# Altium footprint library MyPCBLib.PcbLib: 103 footprints (part 5 of 7)
Each footprint in its own frame and in the unit in brackets; x right, y up, seen from the top. Pads: shape width x height; smd on the part's side, far side on the other; paste and mask are expansions set on the pad; w line width, h text height; cw(c..) or ccw(c..) is an arc to the next point about the centre after c.
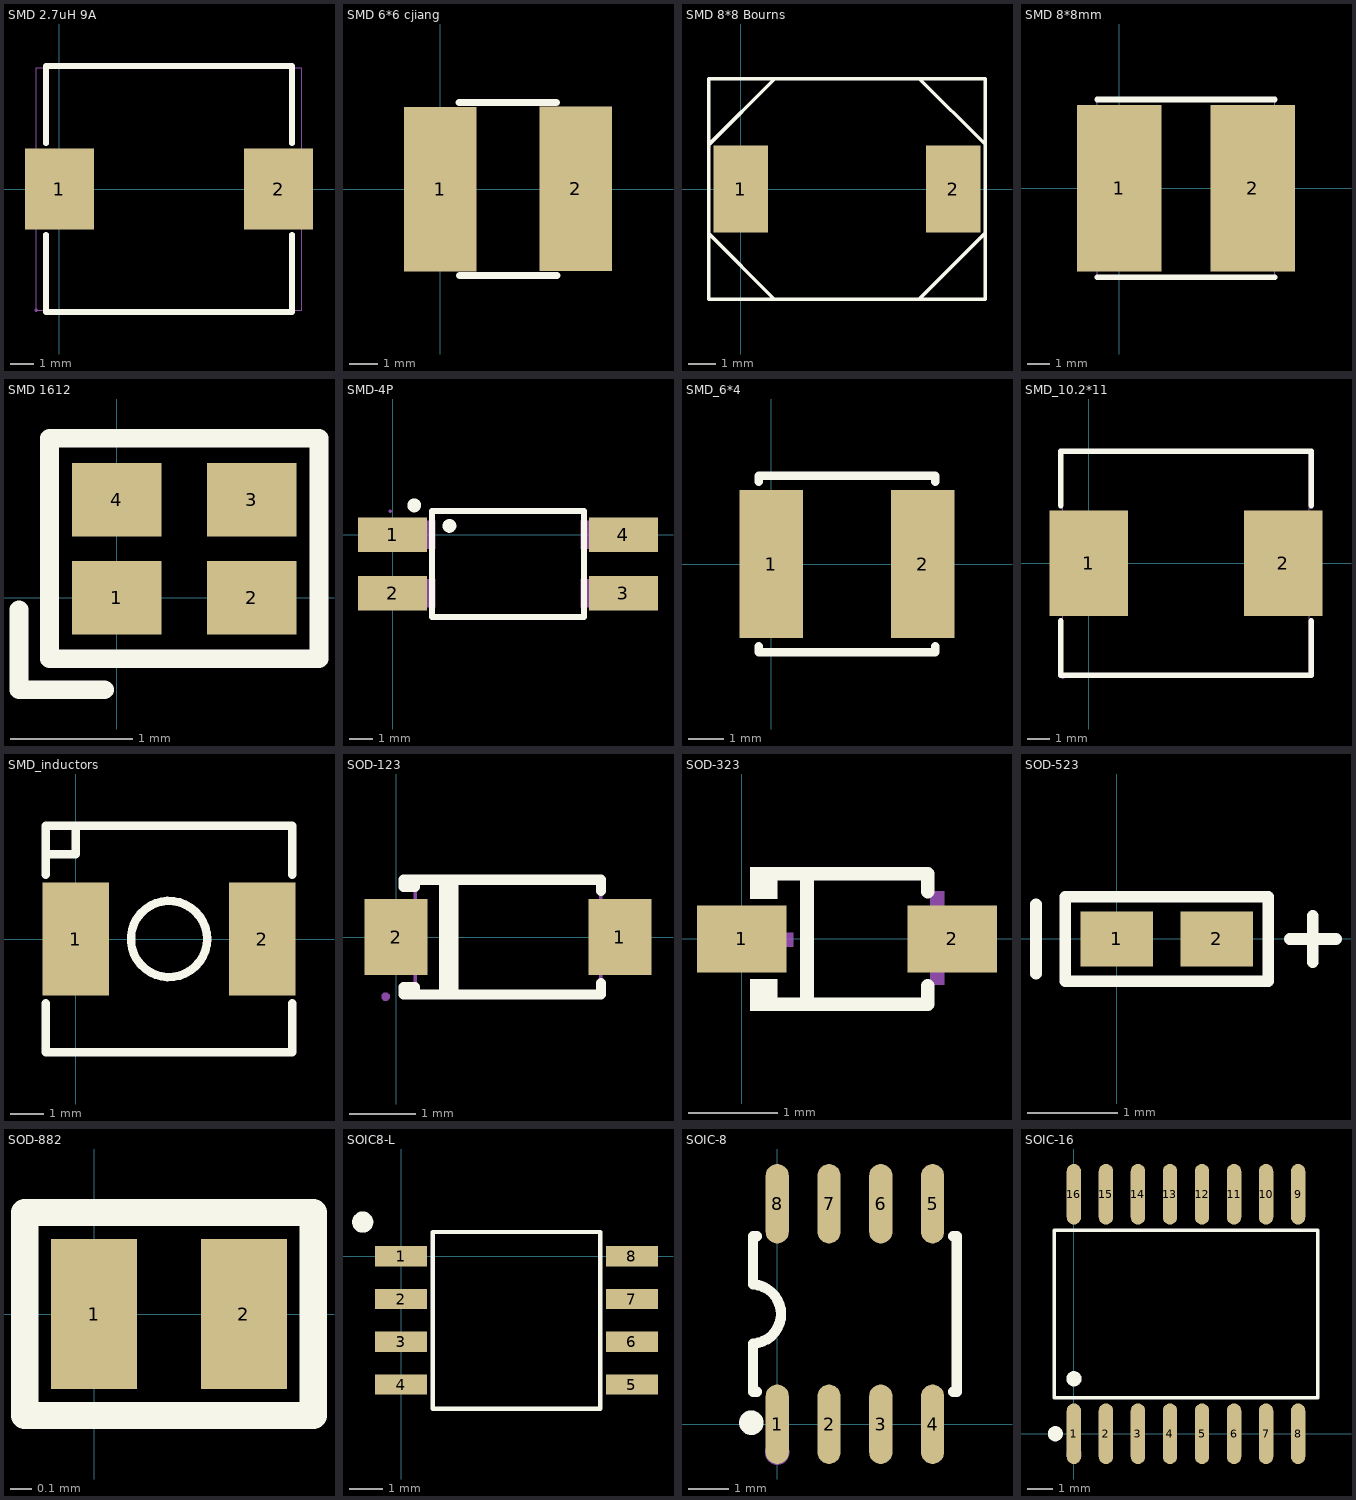
[diagram p4: the footprints below, top view; thin cyan lines are the x and y axes]

## SMD 2.7uH 9A [mm]
pads (2):
  rect 3x3.5 smd mask+0.051: 1(0,0) 2(9.5,0)
Top Overlay:
  lines w0.254: -0.584,-1.981 -0.584,-5.334 10.084,-5.334 10.084,-1.981 ; -0.584,1.981 -0.584,5.334 10.084,5.334 10.084,1.981
Mechanical 15:
  region: 8.5,1.5 10.5,1.5 10.5,-1.5 8.5,-1.5
  region: -1,1.5 1,1.5 1,-1.5 -1,-1.5
  region: -0.94,-5.25 -0.94,-5.225 -0.975,-5.19 -1.025,-5.19 -1.06,-5.225 -1.06,-5.25 -1.06,-5.275 -1.025,-5.31 -0.975,-5.31 -0.94,-5.275
  lines w0.051: -1,-5.25 10.5,-5.25 10.5,5.25 -1,5.25 -1,-5.25

## SMD 6*6 cjiang [mm]
pads (2):
  rect 2.5x5.7 smd: 1(0,0) 2(4.7,0.025)
Top Overlay:
  lines w0.254: 0.657,3.013 4.021,3.013 ; 0.679,-2.987 4.043,-2.987

## SMD 8*8 Bourns [mm]
pads (2):
  rect 2x3.2 smd: 1(0,0) 2(7.8,0)
Top Overlay:
  lines w0.127: -1.158,-1.651 1.233,-4.042 ; -1.143,1.651 1.248,4.042 ; 6.553,-4.035 8.943,-1.644 ; 6.555,4.048 8.946,1.658 ; -1.165,-4.05 -1.165,4.05 8.966,4.05 8.966,-4.05 -1.165,-4.05

## SMD 8*8mm [mm]
pads (2):
  rect 3.8x7.5 smd paste+0 mask+0.051: 1(0,0) 2(6,0)
Top Overlay:
  lines w0.254: -1,-4 7,-4 ; -1,4 7,4
Mechanical 15:
  region: 5,3.15 7,3.15 7,-3.15 5,-3.15
  region: -1,3.15 1,3.15 1,-3.15 -1,-3.15
  region: -0.94,-4 -0.94,-3.975 -0.975,-3.94 -1.025,-3.94 -1.06,-3.975 -1.06,-4 -1.06,-4.025 -1.025,-4.06 -0.975,-4.06 -0.94,-4.025
  lines w0.051: -1,-4 7,-4 7,4 -1,4 -1,-4

## SMD 1612 [mm]
pads (4):
  rect 0.73x0.6 smd paste+0 mask+0.05: 1(0,0) 2(1.1,0) 3(1.1,0.8) 4(0,0.8)
Top Overlay:
  lines w0.152: -0.799,-0.1 -0.799,-0.75 -0.101,-0.75 ; -0.55,-0.5 1.65,-0.5 1.65,1.3 -0.55,1.3 -0.55,-0.45 -0.55,-0.5
Mechanical 6:
  circle w0.2: c-0.05,-0.05 r0.1

## SMD-4P [mm]
pads (4):
  rect 3x1.5 smd paste+0 mask+0.051: 1(0,0) 2(0,-2.54) 3(10,-2.54) 4(10,0)
Top Overlay:
  circle w0.3: c0.936,1.27 r0.15
  circle w0.3: c2.46,0.381 r0.15
  lines w0.254: 1.7,-3.57 8.3,-3.57 8.3,1.03 1.7,1.03 1.7,-3.57
Mechanical 6:
  circle w0.6: c0.428,0 r0.3
Mechanical 15:
  region: -0.04,1.02 -0.04,1.045 -0.075,1.08 -0.125,1.08 -0.16,1.045 -0.16,1.02 -0.16,0.995 -0.125,0.96 -0.075,0.96 -0.04,0.995
  region: 9.1,-3.14 9.1,-1.94 10.1,-1.94 10.1,-3.14
  region: 9.1,-0.6 9.1,0.6 10.1,0.6 10.1,-0.6
  region: 8.15,-0.6 8.15,0.6 9.11,0.6 9.11,-0.6
  region: 0.9,0.6 0.9,-0.6 -0.1,-0.6 -0.1,0.6
  region: 0.9,-1.94 0.9,-3.14 -0.1,-3.14 -0.1,-1.94
  region: 8.15,-3.14 8.15,-1.94 9.11,-1.94 9.11,-3.14
  region: 1.85,0.6 1.85,-0.6 0.89,-0.6 0.89,0.6
  region: 1.85,-1.94 1.85,-3.14 0.89,-3.14 0.89,-1.94
  lines w0.051: 1.75,-3.56 8.25,-3.56 8.25,1.02 1.75,1.02 1.75,-3.56

## SMD_6*4 [mm]
pads (2):
  rect 1.8x4.2 smd mask+0.051: 1(0,0) 2(4.3,0)
Top Overlay:
  lines w0.254: -0.35,-2.331 -0.35,-2.5 4.65,-2.5 4.65,-2.331 ; -0.35,2.331 -0.35,2.5 4.65,2.5 4.65,2.331

## SMD_10.2*11 [mil]
pads (2):
  rect 137.8x185 smd mask+2: 1(0,0) 2(342.6,0)
Top Overlay:
  lines w10: -49.2,-101.6 -49.2,-196.9 391.8,-196.8 391.8,-101.6 ; -49.2,101.6 -49.2,196.9 391.8,196.9 391.8,101.6
Mechanical 15:
  region: -42.8,-200.8 -42.8,-199.81 -44.21,-198.4 -46.19,-198.4 -47.6,-199.81 -47.6,-200.8 -47.6,-201.79 -46.19,-203.2 -44.21,-203.2 -42.8,-201.79
  region: 33.5,59.1 33.5,-59.1 -45.2,-59.1 -45.2,59.1
  region: 387.8,59.1 387.8,-59.1 309.1,-59.1 309.1,59.1
  lines w2: -45.2,-200.8 387.8,-200.8 387.8,200.8 -45.2,200.8 -45.2,-200.8

## SMD_inductors [mm]
pads (2):
  rect 2x3.4 smd: 1(0,0) 2(5.6,0)
Top Overlay:
  circle w0.254: c2.8,0 r1.143
  lines w0.254: -0.9,-3.4 -0.9,-1.931 ; -0.9,1.931 -0.9,3.4 6.5,3.4 6.5,1.931 ; -0.899,-3.4 6.5,-3.4 6.5,-1.931 ; -0.756,2.54 0.006,2.54 0.006,3.302

## SOD-123 [mm]
pads (2):
  rect 0.95x1.15 smd mask+0.051: 1(3.385,0) 2(0,0)
Top Overlay:
  lines w0.152: 0.722,-0.866 0.722,0.866 ; 0.865,-0.866 0.865,0.866 ; 3.099,-0.698 3.099,-0.866 0.286,-0.866 ; 3.099,0.698 3.099,0.866 0.286,0.866 ; 0.286,-0.866 0.112,-0.866 0.112,-0.755 0.286,-0.755 0.286,-0.866 ; 0.286,0.866 0.112,0.866 0.112,0.755 0.286,0.755 0.286,0.866
Mechanical 15:
  region: -0.098,-0.9 -0.098,-0.875 -0.133,-0.84 -0.183,-0.84 -0.218,-0.875 -0.218,-0.9 -0.218,-0.925 -0.183,-0.96 -0.133,-0.96 -0.098,-0.925
  region: -0.158,-0.465 -0.158,0.465 0.392,0.465 0.392,-0.465
  region: 3.543,-0.465 3.543,0.465 2.993,0.465 2.993,-0.465
  lines w0.051: 0.292,-0.9 0.292,0.9 3.092,0.9 3.092,-0.9 0.292,-0.9

## SOD-323 [mm]
pads (2):
  rect 1x0.75 smd: 1(0,0) 2(2.345,0)
Top Overlay:
  region: 0.398,-0.802 0.398,-0.45 0.093,-0.45 0.093,-0.802
  region: 0.398,0.802 0.398,0.45 0.093,0.45 0.093,0.802
  lines w0.152: 0.321,-0.726 2.074,-0.726 2.074,-0.52 ; 0.321,0.726 2.074,0.726 2.074,0.53 ; 0.726,-0.726 0.726,0.726
Mechanical 15:
  region: 2.256,0.53 2.256,-0.51 2.1,-0.51 2.1,0.53
  region: 2.488,0.09 2.488,-0.066 1.864,-0.066 1.864,0.09
  region: -0.052,0.07 -0.052,-0.086 0.572,-0.086 0.572,0.07

## SOD-523 [mm]
pads (2):
  rect 0.8x0.6 smd: 1(0,0) 2(1.1,0)
Top Overlay:
  lines w0.127: -0.889,-0.381 -0.889,0.381 ; 1.905,0 2.413,0 ; 2.159,-0.254 2.159,0.254 ; -0.565,-0.465 -0.565,0.465 1.665,0.465 1.665,-0.465 -0.483,-0.465 -0.565,-0.465

## SOD-882 [mm]
pads (2):
  rect 0.4x0.7 smd mask+0.06: 1(0,0) 2(0.7,0)
Top Overlay:
  lines w0.127: -0.323,-0.473 -0.221,-0.473 1.023,-0.473 1.023,0.474 -0.323,0.474 -0.323,-0.473

## SOIC8-L [mm]
pads (8):
  rect 1.55x0.6 smd: 1(0,0) 2(0,-1.27) 3(0,-2.54) 4(0,-3.81) 5(6.858,-3.81) 6(6.858,-2.54) 7(6.858,-1.27) 8(6.858,0)
Top Overlay:
  circle w0.35: c-1.143,1.016 r0.14
  lines w0.127: 0.939,-4.531 0.939,0.721 5.918,0.721 5.918,0.635 5.918,-4.531 0.939,-4.531
3D body "User Library-SOIC8_(ATTINY12).step": height 2.3, standoff -0.02, extent -0.767,-4.595 7.625,0.785

## SOIC-8 [mil]
pads (8):
  oval 22.38x76.78 smd: 1(0,0) 2(50,0) 3(100,0) 4(150,0) 5(150,213) 6(100,213) 7(50,213) 8(0,213)
Top Overlay:
  circle w11.81: c-25,1.5 r5.91
  lines w10: -23.43,77.89 ccw(c-24.99,106.5) -23.23,135.09 ; -23.43,77.89 -23.43,47.45 -23.43,31.5 -19.83,31.5 ; -23.43,135.09 -23.43,165.56 -23.43,181.5 -19.83,181.5 ; 169.83,31.5 173.43,31.5 173.43,47.45 173.43,165.56 173.43,181.5 169.83,181.5
Mechanical 15:
  circle w11.81: c0,-27.36 r5.91

## SOIC-16 [mm]
pads (16):
  oval 0.574x2.401 smd: 1(0,0) 2(1.27,0) 3(2.54,0) 4(3.81,0) 5(5.08,0) 6(6.35,0) 7(7.62,0) 8(8.89,0) 9(8.89,9.501) 10(7.62,9.501) 11(6.35,9.501) 12(5.08,9.501) 13(3.81,9.501) 14(2.54,9.501) 15(1.27,9.501) 16(0,9.501)
Top Overlay:
  circle w0.3: c0,2.181 r0.15
  circle w0.3: c-0.739,0 r0.15
  lines w0.152: -0.781,1.429 -0.781,8.072 9.671,8.072 9.671,1.429 -0.781,1.429
Mechanical 15:
  circle w0.3: c0,-0.812 r0.15
3D body "User Library-SOIC16_Wide_JEDEC_MS-013AA.sldprt": height 2.62, standoff -0.03, extent -0.805,-0.565 9.695,10.065